# Altium schematic symbol library TSW-101-07-G-D.SchLib: 1 symbol
Pins are listed as number, name and electrical type; pins without a type are passive.

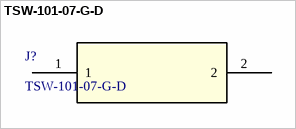
[diagram p0: symbol TSW-101-07-G-D]

## TSW-101-07-G-D
designator J?
No Description Available; Manufacturer_Name: Samtec Inc; Copyright: Copyright (C) 2026 Ultra Librarian. All rights reserved.; Manufacturer_Part_Number: TSW-101-07-G-D; RefDes: RefDes; Type: Type
footprint TSW-101-07-G-D_SAI
pins: 1, 2